# Altium footprint library SSSS820501.PcbLib: 1 footprints
Each footprint in its own frame and in the unit in brackets; x right, y up, seen from the top. Pads: shape width x height; smd on the part's side, far side on the other; paste and mask are expansions set on the pad; w line width, h text height; cw(c..) or ccw(c..) is an arc to the next point about the centre after c.
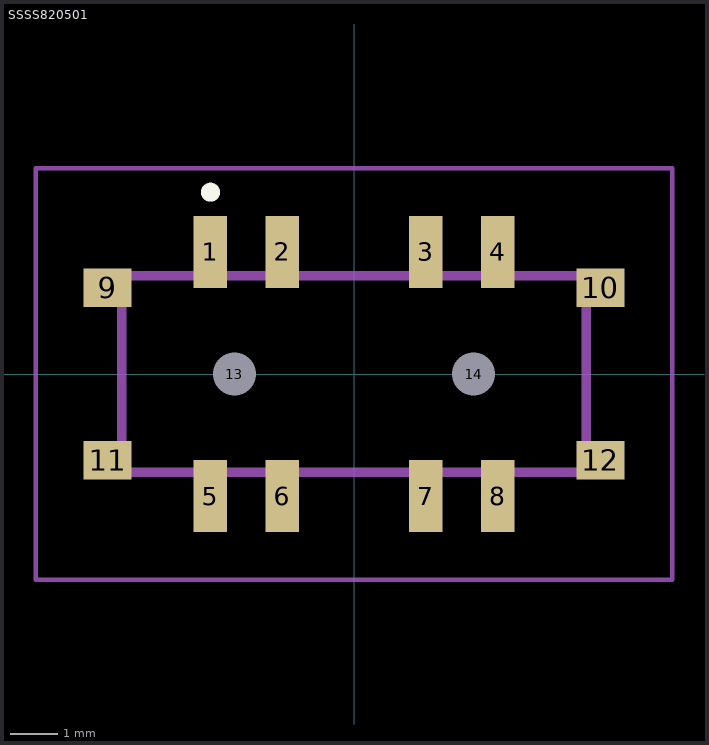
[diagram p0: the footprint, top view; thin cyan lines are the x and y axes]

## SSSS820501 [mm]
pads (14):
  rect 0.7x1.5 smd: 1(-3,2.55) 2(-1.5,2.55) 3(1.5,2.55) 4(3,2.55) 5(-3,-2.55) 6(-1.5,-2.55) 7(1.5,-2.55) 8(3,-2.55)
  rect 1x0.8 smd: 9(-5.15,1.8) 10(5.15,1.8) 11(-5.15,-1.8) 12(5.15,-1.8)
  round 0.45 hole 0.9 unplated: 13(-2.5,0) 14(2.5,0)
Top Overlay:
  lines w0.2: -3.1,3.8 -3.1,3.8 ; -3.1,3.8 ccw(c-3,3.8) -2.9,3.8 ; -3.1,3.8 cw(c-3,3.8) -2.9,3.8 ; -2.9,3.8 -2.9,3.8
Mechanical 15:
  lines w0.2: -4.85,-2.05 4.85,-2.05 4.85,2.05 -4.85,2.05 -4.85,-2.05
Mechanical 20:
  lines w0.1: -6.65,-4.3 6.65,-4.3 6.65,4.3 -6.65,4.3 -6.65,-4.3